# Altium footprint library WS-RSTV.PcbLib: 70 footprints (part 5 of 5)
Each footprint in its own frame and in the unit in brackets; x right, y up, seen from the top. Pads: shape width x height; smd on the part's side, far side on the other; paste and mask are expansions set on the pad; w line width, h text height; cw(c..) or ccw(c..) is an arc to the next point about the centre after c.
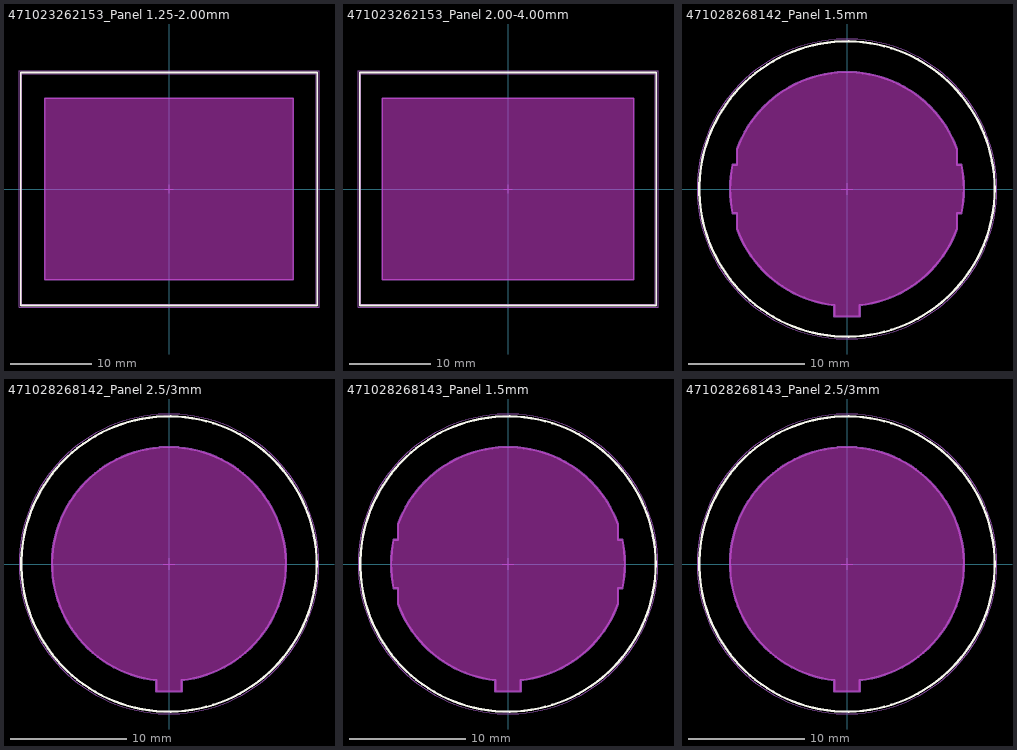
[diagram p4: the footprints below, top view; thin cyan lines are the x and y axes]

## 471023262153_Panel 1.25-2.00mm [mm] "Rocker Switch"
height 12.9
Top Overlay:
  lines w0.2: -18.15,-14.25 -18.15,14.25 18.15,14.25 18.15,-14.25 -18.15,-14.25
Keep-Out Layer:
  board cut-out: -15.2,11.1 15.2,11.1 15.2,-11.1 -15.2,-11.1
Board Shape:
  lines w0.2: -15.2,-11.1 15.2,-11.1 15.2,11.1 -15.2,11.1 -15.2,-11.1
Assembly Notes:
  text "Apply for Panel Thickness 1.25 - 2.00mm" at -13.226,-15.547 h1.5
Top Assembly:
  lines w0.1: -18,-14.1 18,-14.1 18,14.1 -18,14.1 -18,-14.1
Top Designator:
  text ".Designator" at -3.647,-0.357 h1
Top 3D Body:
  lines w0.1: -18,-14.1 18,-14.1 18,14.1 -18,14.1 -18,-14.1
Top Courtyard:
  lines w0.05: -18.35,-14.45 -18.35,14.45 18.35,14.45 18.35,-14.45 -18.35,-14.45
Top Component Center:
  lines w0.1: -0.5,0 0.5,0 ; 0,-0.5 0,0.5
3D body "471023262153.stp": height 15.4, standoff -28.6, extent -18,-14.1 18,14.1

## 471023262153_Panel 2.00-4.00mm [mm] "Rocker Switch"
height 12.9
Top Overlay:
  lines w0.2: -18.15,-14.25 -18.15,14.25 18.15,14.25 18.15,-14.25 -18.15,-14.25
Keep-Out Layer:
  board cut-out: -15.4,11.1 15.4,11.1 15.4,-11.1 -15.4,-11.1
Board Shape:
  lines w0.2: -15.4,-11.1 15.4,-11.1 15.4,11.1 -15.4,11.1 -15.4,-11.1
Assembly Notes:
  text "Apply for Panel Thickness 2.00 - 4.00mm" at -13.226,-15.547 h1.5
Top Assembly:
  lines w0.1: -18,-14.1 18,-14.1 18,14.1 -18,14.1 -18,-14.1
Top Designator:
  text ".Designator" at -3.647,-0.357 h1
Top 3D Body:
  lines w0.1: -18,-14.1 18,-14.1 18,14.1 -18,14.1 -18,-14.1
Top Courtyard:
  lines w0.05: -18.35,-14.45 -18.35,14.45 18.35,14.45 18.35,-14.45 -18.35,-14.45
Top Component Center:
  lines w0.1: -0.5,0 0.5,0 ; 0,-0.5 0,0.5
3D body "471023262153.stp": height 15.4, standoff -28.6, extent -18,-14.1 18,14.1

## 471028268142_Panel 1.5mm [mm]
Top Overlay:
  circle w0.2: c0,0 r12.75
Keep-Out Layer:
  board cut-out: -9.499,-3.431 -9.5,-2.1 -9.879,-2.1 -9.934,-1.841 -10.017,-1.319 -10.072,-0.793 -10.1,-0.264 -10.1,0.265 -10.072,0.793 -10.017,1.319 -9.934,1.841 -9.879,2.1 -9.5,2.1 -9.5,3.431 -9.499,3.431 -9.349,3.846 -8.978,4.648 -8.537,5.415 -8.032,6.139 -7.465,6.817 -6.841,7.443 -6.165,8.012 -5.442,8.52 -4.677,8.963 -3.876,9.337 -3.046,9.64 -2.192,9.869 -1.322,10.023 -0.442,10.1 0.442,10.1 1.322,10.023 2.193,9.869 3.046,9.64 3.876,9.337 4.677,8.963 5.442,8.52 6.165,8.012 6.841,7.443 7.465,6.817 8.032,6.139 8.538,5.414 8.978,4.648 9.349,3.846 9.5,3.431 9.5,2.1 9.879,2.1 9.934,1.841 10.017,1.319 10.072,0.793 10.1,0.264 10.1,-0.264 10.072,-0.793 10.017,-1.319 9.934,-1.841 9.879,-2.1 9.5,-2.1 9.5,-3.431 9.499,-3.431 9.34,-3.873 8.94,-4.722 8.464,-5.532 7.914,-6.293 7.296,-7 6.615,-7.647 5.877,-8.228 5.088,-8.738 4.255,-9.172 3.386,-9.527 2.487,-9.8 1.567,-9.989 1.1,-10.04 1.1,-11 -1.1,-11 -1.1,-10.04 -1.567,-9.989 -2.487,-9.8 -3.386,-9.527 -4.255,-9.172 -5.088,-8.738 -5.877,-8.228 -6.615,-7.647 -7.296,-7 -7.914,-6.293 -8.464,-5.532 -8.94,-4.722 -9.34,-3.873
Board Shape:
  lines w0.2: -9.879,-2.1 cw(c0,0) -9.879,2.1 -9.5,2.1 -9.5,3.431 cw(c0,0) 9.5,3.431 9.5,2.1 9.879,2.1 cw(c0,0) 9.879,-2.1 9.5,-2.1 9.5,-3.431 cw(c0,0) 1.1,-10.04 1.1,-11 -1.1,-11 -1.1,-10.04 cw(c0,0) -9.499,-3.431 -9.5,-2.1 -9.879,-2.1
Assembly Notes:
  text "Apply for Panel Thickness 1.5mm" at -9.279,-14.128 h0.81
Top Assembly:
  circle w0.1: c0,0 r12.75
Top Designator:
  text ".Designator" at -3.647,-0.357 h1
Top 3D Body:
  circle w0.1: c0,0 r12.75
Top Courtyard:
  circle w0.05: c0,0 r12.95
Top Component Center:
  lines w0.1: -0.5,0 0.5,0 ; 0,-0.5 0,0.5
3D body "471028268142.stp": height 12.17, standoff -24, extent -12.75,-12.75 12.75,12.75

## 471028268142_Panel 2.5/3mm [mm]
Top Overlay:
  circle w0.2: c0,0 r12.75
Keep-Out Layer:
  board cut-out: -1.1,-11 1.1,-11 1.1,-10.04 1.576,-9.988 2.514,-9.794 3.43,-9.512 4.314,-9.145 5.16,-8.696 5.96,-8.168 6.706,-7.568 7.392,-6.899 8.012,-6.169 8.559,-5.383 9.03,-4.549 9.42,-3.674 9.726,-2.766 9.944,-1.834 10.073,-0.884 10.111,0.073 10.059,1.029 9.916,1.976 9.685,2.906 9.366,3.809 8.964,4.678 8.481,5.505 7.922,6.283 7.292,7.005 6.597,7.663 5.842,8.253 5.035,8.769 4.182,9.206 3.293,9.56 2.373,9.829 1.432,10.009 0.479,10.1 -0.479,10.1 -1.432,10.009 -2.373,9.829 -3.293,9.56 -4.182,9.206 -5.035,8.769 -5.842,8.253 -6.597,7.663 -7.292,7.005 -7.922,6.283 -8.481,5.505 -8.964,4.678 -9.366,3.809 -9.685,2.906 -9.916,1.976 -10.059,1.029 -10.111,0.073 -10.073,-0.884 -9.944,-1.834 -9.726,-2.766 -9.42,-3.674 -9.03,-4.549 -8.559,-5.383 -8.012,-6.169 -7.392,-6.899 -6.706,-7.568 -5.96,-8.168 -5.16,-8.696 -4.314,-9.145 -3.43,-9.512 -2.514,-9.794 -1.576,-9.988 -1.1,-10.04
Board Shape:
  lines w0.2: -1.1,-11 1.1,-11 1.1,-10.04 ccw(c0,0) -1.1,-10.04 -1.1,-11
Assembly Notes:
  text "Apply for Panel Thickness 2.5/3mm" at -10.003,-14.128 h0.81
Top Assembly:
  circle w0.1: c0,0 r12.75
Top Designator:
  text ".Designator" at -3.647,-0.357 h1
Top 3D Body:
  circle w0.1: c0,0 r12.75
Top Courtyard:
  circle w0.05: c0,0 r12.95
Top Component Center:
  lines w0.1: -0.5,0 0.5,0 ; 0,-0.5 0,0.5
3D body "471028268142.stp": height 12.17, standoff -24, extent -12.75,-12.75 12.75,12.75

## 471028268143_Panel 1.5mm [mm]
Top Overlay:
  circle w0.2: c0,0 r12.75
Keep-Out Layer:
  board cut-out: -9.499,-3.431 -9.5,-2.1 -9.879,-2.1 -9.934,-1.841 -10.017,-1.319 -10.072,-0.793 -10.1,-0.264 -10.1,0.265 -10.072,0.793 -10.017,1.319 -9.934,1.841 -9.879,2.1 -9.5,2.1 -9.5,3.431 -9.499,3.431 -9.349,3.846 -8.978,4.648 -8.537,5.415 -8.032,6.139 -7.465,6.817 -6.841,7.443 -6.165,8.012 -5.442,8.52 -4.677,8.963 -3.876,9.337 -3.046,9.64 -2.192,9.869 -1.322,10.023 -0.442,10.1 0.442,10.1 1.322,10.023 2.193,9.869 3.046,9.64 3.876,9.337 4.677,8.963 5.442,8.52 6.165,8.012 6.841,7.443 7.465,6.817 8.032,6.139 8.538,5.414 8.978,4.648 9.349,3.846 9.5,3.431 9.5,2.1 9.879,2.1 9.934,1.841 10.017,1.319 10.072,0.793 10.1,0.264 10.1,-0.264 10.072,-0.793 10.017,-1.319 9.934,-1.841 9.879,-2.1 9.5,-2.1 9.5,-3.431 9.499,-3.431 9.34,-3.873 8.94,-4.722 8.464,-5.532 7.914,-6.293 7.296,-7 6.615,-7.647 5.877,-8.228 5.088,-8.738 4.255,-9.172 3.386,-9.527 2.487,-9.8 1.567,-9.989 1.1,-10.04 1.1,-11 -1.1,-11 -1.1,-10.04 -1.567,-9.989 -2.487,-9.8 -3.386,-9.527 -4.255,-9.172 -5.088,-8.738 -5.877,-8.228 -6.615,-7.647 -7.296,-7 -7.914,-6.293 -8.464,-5.532 -8.94,-4.722 -9.34,-3.873
Board Shape:
  lines w0.2: -9.879,-2.1 cw(c0,0) -9.879,2.1 -9.5,2.1 -9.5,3.431 cw(c0,0) 9.5,3.431 9.5,2.1 9.879,2.1 cw(c0,0) 9.879,-2.1 9.5,-2.1 9.5,-3.431 cw(c0,0) 1.1,-10.04 1.1,-11 -1.1,-11 -1.1,-10.04 cw(c0,0) -9.499,-3.431 -9.5,-2.1 -9.879,-2.1
Assembly Notes:
  text "Apply for Panel Thickness 1.5mm" at -9.279,-14.128 h0.81
Top Assembly:
  circle w0.1: c0,0 r12.75
Top Designator:
  text ".Designator" at -3.647,-0.357 h1
Top 3D Body:
  circle w0.1: c0,0 r12.75
Top Courtyard:
  circle w0.05: c0,0 r12.95
Top Component Center:
  lines w0.1: -0.5,0 0.5,0 ; 0,-0.5 0,0.5
3D body "471028268143.stp": height 12.17, standoff -24, extent -12.75,-12.75 12.75,12.75

## 471028268143_Panel 2.5/3mm [mm]
Top Overlay:
  circle w0.2: c0,0 r12.75
Keep-Out Layer:
  board cut-out: -1.1,-11 1.1,-11 1.1,-10.04 1.576,-9.988 2.514,-9.794 3.43,-9.512 4.314,-9.145 5.16,-8.696 5.96,-8.168 6.706,-7.568 7.392,-6.899 8.012,-6.169 8.559,-5.383 9.03,-4.549 9.42,-3.674 9.726,-2.766 9.944,-1.834 10.073,-0.884 10.111,0.073 10.059,1.029 9.916,1.976 9.685,2.906 9.366,3.809 8.964,4.678 8.481,5.505 7.922,6.283 7.292,7.005 6.597,7.663 5.842,8.253 5.035,8.769 4.182,9.206 3.293,9.56 2.373,9.829 1.432,10.009 0.479,10.1 -0.479,10.1 -1.432,10.009 -2.373,9.829 -3.293,9.56 -4.182,9.206 -5.035,8.769 -5.842,8.253 -6.597,7.663 -7.292,7.005 -7.922,6.283 -8.481,5.505 -8.964,4.678 -9.366,3.809 -9.685,2.906 -9.916,1.976 -10.059,1.029 -10.111,0.073 -10.073,-0.884 -9.944,-1.834 -9.726,-2.766 -9.42,-3.674 -9.03,-4.549 -8.559,-5.383 -8.012,-6.169 -7.392,-6.899 -6.706,-7.568 -5.96,-8.168 -5.16,-8.696 -4.314,-9.145 -3.43,-9.512 -2.514,-9.794 -1.576,-9.988 -1.1,-10.04
Board Shape:
  lines w0.2: -1.1,-11 1.1,-11 1.1,-10.04 ccw(c0,0) -1.1,-10.04 -1.1,-11
Assembly Notes:
  text "Apply for Panel Thickness 2.5/3mm" at -10.003,-14.128 h0.81
Top Assembly:
  circle w0.1: c0,0 r12.75
Top Designator:
  text ".Designator" at -3.647,-0.357 h1
Top 3D Body:
  circle w0.1: c0,0 r12.75
Top Courtyard:
  circle w0.05: c0,0 r12.95
Top Component Center:
  lines w0.1: -0.5,0 0.5,0 ; 0,-0.5 0,0.5
3D body "471028268143.stp": height 12.17, standoff -24, extent -12.75,-12.75 12.75,12.75